# Altium integrated library 3386F-1-103T.IntLib: 1 symbol
Pins are listed as number, name and electrical type; pins without a type are passive.

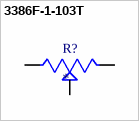
[diagram p0: symbol 3386F-1-103T]

## 3386F-1-103T
designator R?
10 kOhms 0.5W, 1/2W PC Pins Through Hole Trimmer Potentiometer Cermet 1.0 Turn Top Finger Adjustment; MF: Bourns; MP: 3386F-1-103; Purchase-URL: https://pricing.snapeda.com/search/part/3386F-1-103/?ref=eda; Package: 3386F-3 Bourns; Value: *; Availability: In Stock; Price: None; SnapEDA_Link: https://www.snapeda.com/parts/3386F-1-103/Bourns/view-part/?ref=snap; Check_prices: https://www.snapeda.com/parts/3386F-1-103/Bourns/view-part/?ref=eda
footprint TRIM_3386F-1-103T
pins: 1 CCW, 2 WIPER, 3 CW